# Altium schematic symbol library SSW-110-01-T-D.SchLib: 1 symbol
Pins are listed as number, name and electrical type; pins without a type are passive.

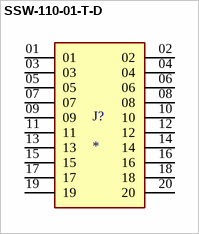
[diagram p0: symbol SSW-110-01-T-D]

## SSW-110-01-T-D
designator J?
MF: Samtec; MP: SSW-110-01-T-D; Price: None; Value: *; Package: None; Availability: Unavailable
footprint SAMTEC_SSW-110-01-T-D
pins: 01, 02, 03, 04, 05, 06, 07, 08, 09, 10, 11, 12, 13, 14, 15, 16, 17, 18, 19, 20